# Altium footprint library SamacSys.PcbLib: 1008 footprints (part 34 of 63)
Each footprint in its own frame and in the unit in brackets; x right, y up, seen from the top. Pads: shape width x height; smd on the part's side, far side on the other; paste and mask are expansions set on the pad; w line width, h text height; cw(c..) or ccw(c..) is an arc to the next point about the centre after c.
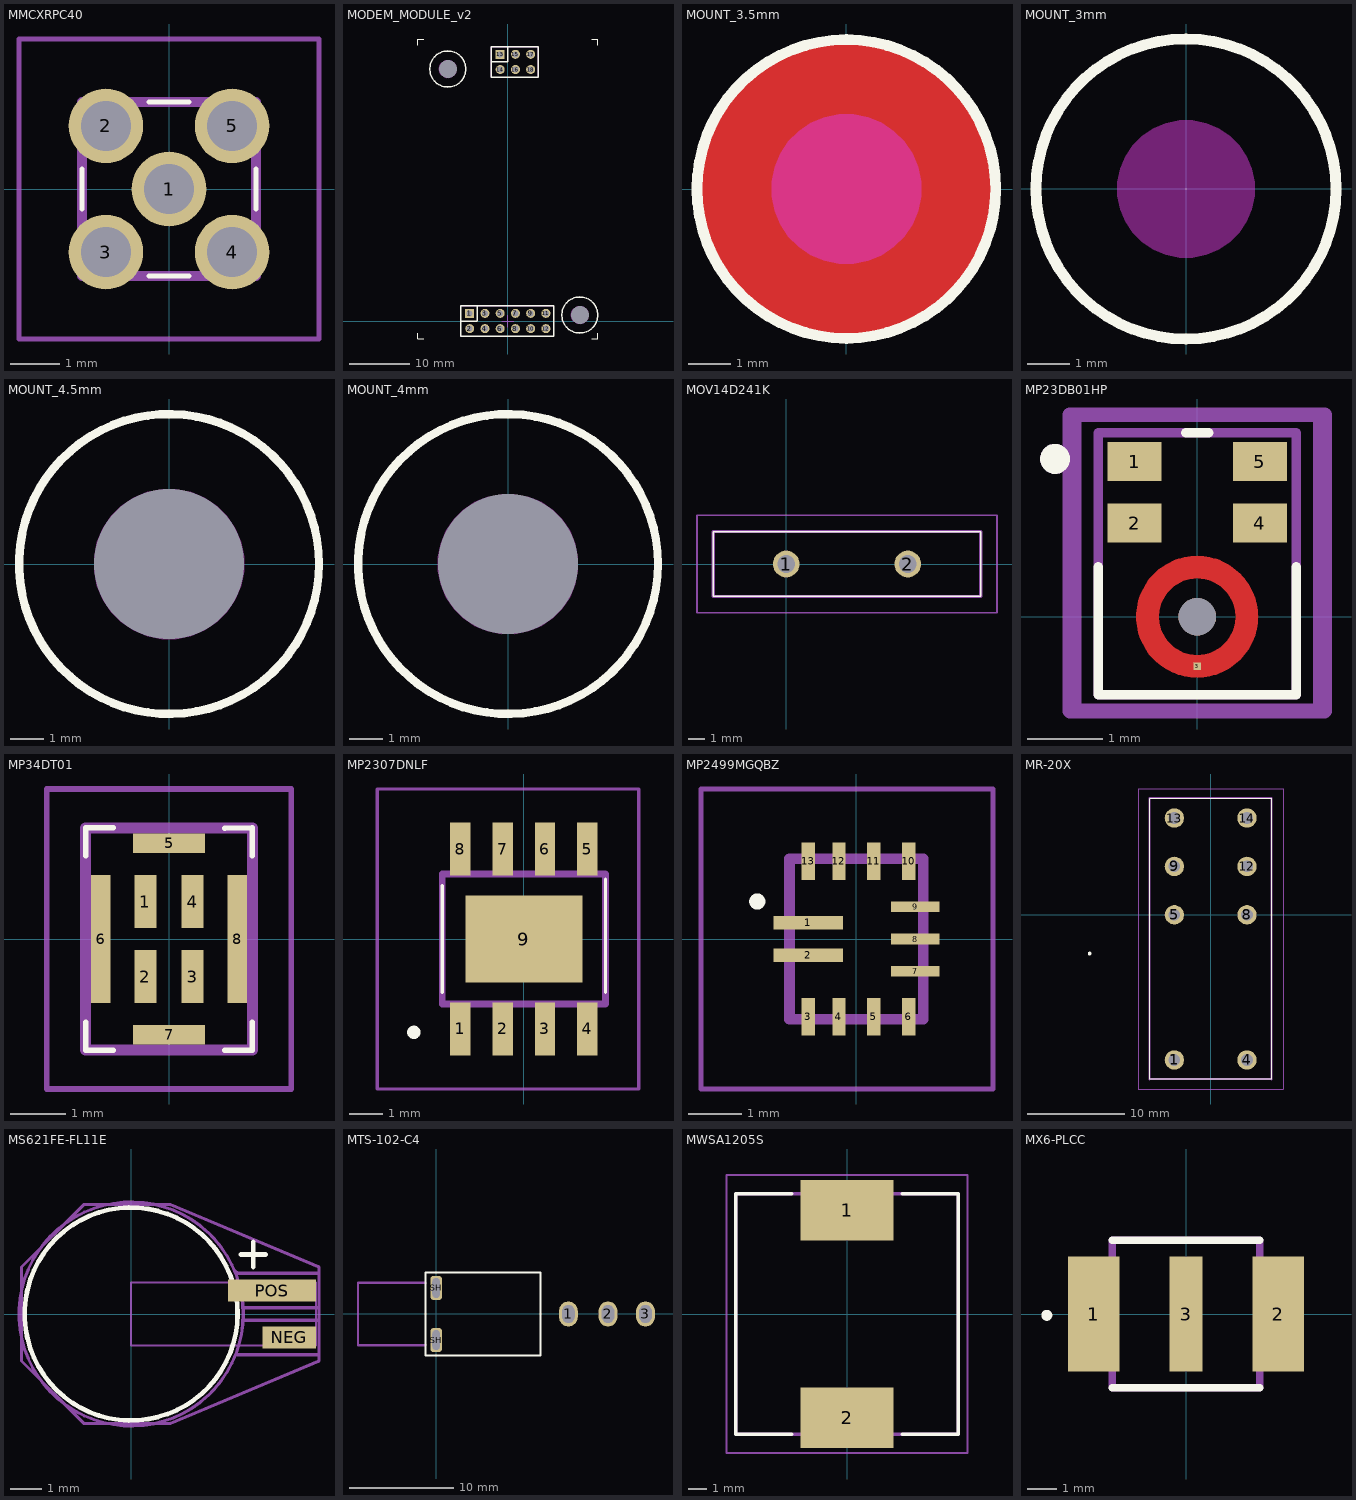
[diagram p33: the footprints below, top view; thin cyan lines are the x and y axes]

## MMCXRPC40 [mm]
pads (5):
  round 1.5 hole 1: 1(0,0) 2(-1.27,1.27) 3(-1.27,-1.27) 4(1.27,-1.27) 5(1.27,1.27)
Top Overlay:
  lines w0.1: -1.75,-0.4 -1.75,0.4 ; -0.4,-1.75 0.4,-1.75 ; -0.4,1.75 0.4,1.75 ; 1.75,-0.4 1.75,0.4
Assembly:
  lines w0.2: -1.75,-1.75 -1.75,1.75 1.75,1.75 1.75,-1.75 -1.75,-1.75
Countryard:
  lines w0.1: -3.02,-3.02 -3.02,3.02 3.02,3.02 3.02,-3.02 -3.02,-3.02
3D body "MMCX-R-PC(40).stp": height 4.49, standoff -2.88, extent -1.75,-1.75 1.75,1.75

## MODEM_MODULE_v2 [mm]
height 10
pads (20):
  rect 1.5x1.5 hole 1: 1(-6.35,1.27) 13(-1.27,44.45)
  round 1.5 hole 1: 2(-6.35,-1.27) 3(-3.81,1.27) 4(-3.81,-1.27) 5(-1.27,1.27) 6(-1.27,-1.27) 7(1.27,1.27) 8(1.27,-1.27) 9(3.81,1.27) 10(3.81,-1.27) 11(6.35,1.27) 12(6.35,-1.27) 14(-1.27,41.91) 15(1.27,44.45) 16(1.27,41.91) 17(3.81,44.45) 18(3.81,41.91)
  round 0 hole 3 unplated: ""(-10,42) ""(12,1)
Top Overlay:
  circle w0.254: c-10,42 r3
  circle w0.254: c12,1 r3
  lines w0.2: -15,-2 -15,-3 -14,-3 ; -15,46 -15,47 -14,47 ; 14,-3 15,-3 15,-2 ; 14,47 15,47 15,46
  lines w0.25: -7.874,0 -5.08,0 ; -5.062,0.018 -5.062,2.54 ; -2.794,43.18 0,43.18 ; 0.018,43.198 0.018,45.72 ; -7.874,-2.54 -7.874,2.54 7.62,2.54 7.62,-2.54 -7.874,-2.54 ; -2.794,40.64 -2.794,45.72 5.08,45.72 5.08,40.64 -2.794,40.64
Top Paste:
  pour cut-out: -12.938,41.984 -12.938,41.787 -12.887,41.397 -12.785,41.018 -12.634,40.654 -12.438,40.314 -12.198,40.002 -11.92,39.724 -11.608,39.484 -11.268,39.288 -10.904,39.137 -10.525,39.035 -10.135,38.984 -9.938,38.984 -9.741,38.984 -9.351,39.035 -8.972,39.137 -8.608,39.288 -8.268,39.484 -7.956,39.724 -7.678,40.002 -7.438,40.314 -7.242,40.654 -7.091,41.018 -6.989,41.397 -6.938,41.787 -6.938,41.984 -6.938,42.181 -6.989,42.571 -7.091,42.95 -7.242,43.314 -7.438,43.654 -7.678,43.966 -7.956,44.244 -8.268,44.484 -8.608,44.68 -8.972,44.831 -9.351,44.933 -9.741,44.984 -9.938,44.984 -10.135,44.984 -10.525,44.933 -10.904,44.831 -11.268,44.68 -11.608,44.484 -11.92,44.244 -12.198,43.966 -12.438,43.654 -12.634,43.314 -12.785,42.95 -12.887,42.571 -12.938,42.181
  pour cut-out: 9.062,0.984 9.062,0.787 9.113,0.397 9.215,0.018 9.366,-0.346 9.562,-0.686 9.802,-0.998 10.08,-1.276 10.392,-1.516 10.732,-1.712 11.096,-1.863 11.475,-1.965 11.865,-2.016 12.062,-2.016 12.259,-2.016 12.649,-1.965 13.028,-1.863 13.392,-1.712 13.732,-1.516 14.044,-1.276 14.322,-0.998 14.562,-0.686 14.758,-0.346 14.909,0.018 15.011,0.397 15.062,0.787 15.062,0.984 15.062,1.181 15.011,1.571 14.909,1.95 14.758,2.314 14.562,2.654 14.322,2.966 14.044,3.244 13.732,3.484 13.392,3.68 13.028,3.831 12.649,3.933 12.259,3.984 12.062,3.984 11.865,3.984 11.475,3.933 11.096,3.831 10.732,3.68 10.392,3.484 10.08,3.244 9.802,2.966 9.562,2.654 9.366,2.314 9.215,1.95 9.113,1.571 9.062,1.181
Keep-Out Layer:
  board cut-out: -10,40.5 -10.148,40.5 -10.438,40.558 -10.711,40.671 -10.956,40.835 -11.165,41.044 -11.329,41.289 -11.442,41.562 -11.5,41.852 -11.5,42 -11.5,42.148 -11.442,42.438 -11.329,42.71 -11.165,42.956 -10.956,43.165 -10.711,43.329 -10.438,43.442 -10.148,43.5 -10,43.5 -9.852,43.5 -9.562,43.442 -9.29,43.329 -9.044,43.165 -8.835,42.956 -8.671,42.711 -8.558,42.438 -8.5,42.148 -8.5,42 -8.5,41.852 -8.558,41.562 -8.671,41.289 -8.835,41.044 -9.044,40.835 -9.289,40.671 -9.562,40.558 -9.852,40.5
  board cut-out: 12,-0.5 11.852,-0.5 11.562,-0.442 11.289,-0.329 11.044,-0.165 10.835,0.044 10.671,0.289 10.558,0.562 10.5,0.852 10.5,1 10.5,1.148 10.558,1.438 10.671,1.71 10.835,1.956 11.044,2.165 11.289,2.329 11.562,2.442 11.852,2.5 12,2.5 12.148,2.5 12.438,2.442 12.71,2.329 12.956,2.165 13.165,1.956 13.329,1.711 13.442,1.438 13.5,1.148 13.5,1 13.5,0.852 13.442,0.562 13.329,0.289 13.165,0.044 12.956,-0.165 12.711,-0.329 12.438,-0.442 12.148,-0.5
Assembly:
  lines w0.1: -2.794,40.64 -2.794,45.72 2.794,45.72 ; -7.874,-2.54 7.62,-2.54 7.62,2.54 -7.874,2.54 -7.874,-2.54
Countryard:
  lines w0.1: -2.794,40.64 -2.794,45.72 5.08,45.72 5.08,40.64 ; -0.984,0 1.016,0 ; 0,-1 0,1 ; -7.874,-2.54 7.62,-2.54 7.62,2.54 -7.874,2.54 -7.874,-2.54
Multi-Layer:
  pour cut-out: -10,39 -10.197,39 -10.587,39.051 -10.966,39.153 -11.33,39.304 -11.67,39.5 -11.982,39.74 -12.26,40.018 -12.5,40.33 -12.696,40.67 -12.847,41.034 -12.949,41.413 -13,41.803 -13,42 -13,42.197 -12.949,42.586 -12.847,42.966 -12.696,43.33 -12.5,43.67 -12.26,43.982 -11.982,44.26 -11.67,44.5 -11.33,44.696 -10.966,44.847 -10.587,44.949 -10.197,45 -10,45 -9.803,45 -9.414,44.949 -9.034,44.847 -8.67,44.696 -8.33,44.5 -8.018,44.26 -7.74,43.982 -7.5,43.67 -7.304,43.33 -7.153,42.966 -7.051,42.587 -7,42.197 -7,42 -7,41.803 -7.051,41.413 -7.153,41.034 -7.304,40.67 -7.5,40.33 -7.74,40.018 -8.018,39.74 -8.33,39.5 -8.67,39.304 -9.034,39.153 -9.413,39.051 -9.803,39
  pour cut-out: 12,-2 11.803,-2 11.413,-1.949 11.034,-1.847 10.67,-1.696 10.33,-1.5 10.018,-1.26 9.74,-0.982 9.5,-0.67 9.304,-0.33 9.153,0.034 9.051,0.413 9,0.803 9,1 9,1.197 9.051,1.586 9.153,1.966 9.304,2.33 9.5,2.67 9.74,2.982 10.018,3.26 10.33,3.5 10.67,3.696 11.034,3.847 11.413,3.949 11.803,4 12,4 12.197,4 12.586,3.949 12.966,3.847 13.33,3.696 13.67,3.5 13.982,3.26 14.26,2.982 14.5,2.67 14.696,2.33 14.847,1.966 14.949,1.587 15,1.197 15,1 15,0.803 14.949,0.413 14.847,0.034 14.696,-0.33 14.5,-0.67 14.26,-0.982 13.982,-1.26 13.67,-1.5 13.33,-1.696 12.966,-1.847 12.586,-1.949 12.197,-2
3D body "PCHSN-10.STEP": height 10, standoff -5, extent 9.5,-1.887 14.5,3.887
3D body "PCHSN-10.STEP": height 10, standoff -5, extent -12.5,39.113 -7.5,44.887
3D body "User Library-PBD_(DS1023-2)_2line_connectors_h=5_0_8_5mm_step_2_54mm.step": height 8.5, standoff -3, extent -2.79,40.7 2.79,45.7
3D body "User Library-PBD_(DS1023-2)_2line_connectors_h=5_0_8_5mm_step_2_54mm (1).step": height 8.5, standoff -3, extent -7.87,-2.48 7.87,2.52

## MOUNT_3.5mm [mm] "H3.5 / OUT7"
Top Layer:
  pour cut-out: 0,-3.5 -0.229,-3.5 -0.684,-3.44 -1.127,-3.321 -1.551,-3.146 -1.949,-2.916 -2.313,-2.637 -2.637,-2.313 -2.916,-1.949 -3.146,-1.551 -3.321,-1.127 -3.44,-0.684 -3.5,-0.229 -3.5,0 -3.5,0.229 -3.44,0.684 -3.321,1.127 -3.146,1.551 -2.916,1.949 -2.637,2.313 -2.313,2.637 -1.949,2.916 -1.551,3.146 -1.127,3.321 -0.684,3.44 -0.229,3.5 0,3.5 0.229,3.5 0.684,3.44 1.127,3.321 1.551,3.146 1.949,2.916 2.313,2.637 2.637,2.313 2.916,1.949 3.146,1.551 3.321,1.127 3.44,0.684 3.5,0.229 3.5,0 3.5,-0.229 3.44,-0.684 3.321,-1.127 3.146,-1.551 2.916,-1.949 2.637,-2.313 2.313,-2.637 1.949,-2.916 1.551,-3.146 1.127,-3.321 0.684,-3.44 0.229,-3.5
Bottom Layer:
  pour cut-out: 0.031,-3.5 -0.198,-3.5 -0.653,-3.44 -1.096,-3.321 -1.52,-3.146 -1.918,-2.916 -2.282,-2.637 -2.606,-2.313 -2.885,-1.949 -3.115,-1.551 -3.29,-1.127 -3.409,-0.684 -3.469,-0.229 -3.469,0 -3.469,0.229 -3.409,0.684 -3.29,1.127 -3.115,1.551 -2.885,1.949 -2.606,2.313 -2.282,2.637 -1.918,2.916 -1.52,3.146 -1.096,3.321 -0.653,3.44 -0.198,3.5 0.031,3.5 0.26,3.5 0.715,3.44 1.159,3.321 1.582,3.146 1.98,2.916 2.344,2.637 2.668,2.313 2.947,1.949 3.177,1.551 3.352,1.127 3.471,0.684 3.531,0.229 3.531,0 3.531,-0.229 3.471,-0.684 3.352,-1.127 3.177,-1.551 2.947,-1.949 2.668,-2.313 2.344,-2.637 1.98,-2.916 1.582,-3.146 1.159,-3.321 0.715,-3.44 0.26,-3.5
Top Overlay:
  circle w0.254: c0,0 r3.5
Keep-Out Layer:
  board cut-out: 0,-1.75 -0.172,-1.75 -0.51,-1.683 -0.829,-1.551 -1.116,-1.359 -1.359,-1.116 -1.551,-0.829 -1.683,-0.51 -1.75,-0.172 -1.75,0 -1.75,0.172 -1.683,0.51 -1.551,0.829 -1.359,1.116 -1.116,1.359 -0.829,1.551 -0.51,1.683 -0.172,1.75 0,1.75 0.172,1.75 0.51,1.683 0.829,1.551 1.116,1.359 1.359,1.116 1.551,0.829 1.683,0.51 1.75,0.172 1.75,0 1.75,-0.172 1.683,-0.51 1.551,-0.829 1.359,-1.116 1.116,-1.359 0.829,-1.551 0.51,-1.683 0.172,-1.75

## MOUNT_3mm [mm] "H3/OUT6"
Top Overlay:
  circle w0.254: c0,0 r3.5
Keep-Out Layer:
  board cut-out: 0,-1.6 -0.158,-1.6 -0.467,-1.539 -0.758,-1.418 -1.02,-1.243 -1.243,-1.02 -1.418,-0.758 -1.539,-0.467 -1.6,-0.158 -1.6,0 -1.6,0.158 -1.539,0.467 -1.418,0.758 -1.243,1.02 -1.02,1.243 -0.758,1.418 -0.467,1.538 -0.158,1.6 0,1.6 0.158,1.6 0.467,1.539 0.758,1.418 1.02,1.243 1.243,1.02 1.418,0.758 1.538,0.467 1.6,0.158 1.6,0 1.6,-0.158 1.539,-0.467 1.418,-0.758 1.243,-1.02 1.02,-1.243 0.758,-1.418 0.467,-1.539 0.158,-1.6
Multi-Layer:
  pour cut-out: 0,-3.5 -0.229,-3.5 -0.684,-3.44 -1.127,-3.321 -1.551,-3.146 -1.949,-2.916 -2.313,-2.637 -2.637,-2.313 -2.916,-1.949 -3.146,-1.551 -3.321,-1.127 -3.44,-0.684 -3.5,-0.229 -3.5,0 -3.5,0.229 -3.44,0.684 -3.321,1.127 -3.146,1.551 -2.916,1.949 -2.637,2.313 -2.313,2.637 -1.949,2.916 -1.551,3.146 -1.127,3.321 -0.684,3.44 -0.229,3.5 0,3.5 0.229,3.5 0.684,3.44 1.127,3.321 1.551,3.146 1.949,2.916 2.313,2.637 2.637,2.313 2.916,1.949 3.146,1.551 3.321,1.127 3.44,0.684 3.5,0.229 3.5,0 3.5,-0.229 3.44,-0.684 3.321,-1.127 3.146,-1.551 2.916,-1.949 2.637,-2.313 2.313,-2.637 1.949,-2.916 1.551,-3.146 1.127,-3.321 0.684,-3.44 0.229,-3.5

## MOUNT_4.5mm [mm] "H4.5 / OUT9"
pads (1):
  round 0 hole 4.5 unplated: ""(0,0)
Top Overlay:
  circle w0.254: c0,0 r4.5
Keep-Out Layer:
  board cut-out: 0,-2.25 -0.222,-2.25 -0.656,-2.164 -1.066,-1.994 -1.434,-1.748 -1.748,-1.434 -1.994,-1.066 -2.164,-0.656 -2.25,-0.222 -2.25,0 -2.25,0.222 -2.164,0.656 -1.994,1.066 -1.748,1.434 -1.434,1.748 -1.066,1.994 -0.656,2.164 -0.222,2.25 0,2.25 0.222,2.25 0.656,2.164 1.066,1.994 1.434,1.748 1.748,1.434 1.994,1.066 2.164,0.656 2.25,0.222 2.25,0 2.25,-0.222 2.164,-0.656 1.994,-1.066 1.748,-1.434 1.434,-1.748 1.066,-1.994 0.656,-2.164 0.222,-2.25
Multi-Layer:
  pour cut-out: 0,-4.5 -0.295,-4.5 -0.88,-4.423 -1.45,-4.27 -1.995,-4.045 -2.505,-3.75 -2.973,-3.391 -3.391,-2.973 -3.75,-2.505 -4.045,-1.995 -4.27,-1.45 -4.423,-0.88 -4.5,-0.295 -4.5,0 -4.5,0.295 -4.423,0.88 -4.27,1.45 -4.045,1.995 -3.75,2.505 -3.391,2.973 -2.973,3.391 -2.505,3.75 -1.995,4.045 -1.45,4.27 -0.88,4.423 -0.295,4.5 0,4.5 0.295,4.5 0.88,4.423 1.45,4.27 1.995,4.045 2.505,3.75 2.973,3.391 3.391,2.973 3.75,2.505 4.045,1.995 4.27,1.45 4.423,0.88 4.5,0.295 4.5,0 4.5,-0.295 4.423,-0.88 4.27,-1.45 4.045,-1.995 3.75,-2.505 3.391,-2.973 2.973,-3.391 2.505,-3.75 1.995,-4.045 1.45,-4.27 0.88,-4.423 0.295,-4.5

## MOUNT_4mm [mm] "H4 / OUT9"
pads (1):
  round 0 hole 4.2 unplated: ""(0,0)
Top Overlay:
  circle w0.254: c0,0 r4.5
Keep-Out Layer:
  board cut-out: 0,-2.1 -0.207,-2.1 -0.613,-2.019 -0.995,-1.861 -1.339,-1.631 -1.631,-1.339 -1.861,-0.995 -2.019,-0.613 -2.1,-0.207 -2.1,0 -2.1,0.207 -2.019,0.613 -1.861,0.995 -1.631,1.339 -1.339,1.631 -0.995,1.861 -0.613,2.019 -0.207,2.1 0,2.1 0.207,2.1 0.613,2.019 0.995,1.861 1.339,1.631 1.631,1.339 1.861,0.995 2.019,0.613 2.1,0.207 2.1,0 2.1,-0.207 2.019,-0.613 1.861,-0.995 1.631,-1.339 1.339,-1.631 0.995,-1.861 0.613,-2.019 0.207,-2.1
Multi-Layer:
  pour cut-out: 0,-4.5 -0.295,-4.5 -0.88,-4.423 -1.45,-4.27 -1.995,-4.045 -2.505,-3.75 -2.973,-3.391 -3.391,-2.973 -3.75,-2.505 -4.045,-1.995 -4.27,-1.45 -4.423,-0.88 -4.5,-0.295 -4.5,0 -4.5,0.295 -4.423,0.88 -4.27,1.45 -4.045,1.995 -3.75,2.505 -3.391,2.973 -2.973,3.391 -2.505,3.75 -1.995,4.045 -1.45,4.27 -0.88,4.423 -0.295,4.5 0,4.5 0.295,4.5 0.88,4.423 1.45,4.27 1.995,4.045 2.505,3.75 2.973,3.391 3.391,2.973 3.75,2.505 4.045,1.995 4.27,1.45 4.423,0.88 4.5,0.295 4.5,0 4.5,-0.295 4.423,-0.88 4.27,-1.45 4.045,-1.995 3.75,-2.505 3.391,-2.973 2.973,-3.391 2.505,-3.75 1.995,-4.045 1.45,-4.27 0.88,-4.423 0.295,-4.5

## MOV14D241K [mm]
pads (2):
  round 1.65 hole 1.1: 1(0,0) 2(7.5,0)
Top Overlay:
  lines w0.1: -4.5,-2 -4.5,2 12,2 12,-2 -4.5,-2
Assembly:
  lines w0.2: -4.5,-2 -4.5,2 12,2 12,-2 -4.5,-2
Countryard:
  lines w0.1: -5.5,-3 -5.5,3 13,3 13,-3 -5.5,-3
3D body "mov-14d241k.stp": height 22.23, standoff -17.75, extent -4.45,-2 12.05,2

## MP23DB01HP [mm]
pads (6):
  rect 0.725x0.522 smd paste-1: 1(-0.837,2.074) 2(-0.837,1.252) 4(0.837,1.252) 5(0.837,2.074)
  rect 0.1x0.1 smd paste-1 mask+0: 3(0,-0.662)
  round 0.5 hole 0.5 unplated: ""(0,0)
Top Layer:
  region: 242 vertices and 0 holes, not listed, extent -0.813,-0.812 0.813,0.813
Top Overlay:
  circle w0.2: c-1.9,2.11 r0.1
  lines w0.127: -1.325,0.671 -1.325,-1.04 1.325,-1.04 1.325,0.671 ; -0.155,2.46 0.155,2.46
Top Paste:
  drawing of 6 lines, arcs and shapes, not listed
Top Solder:
  circle w0.913: c0,0 r0.456
Assembly:
  circle w0.2: c-1.9,2.11 r0.1
  lines w0.127: -1.325,-1.04 1.325,-1.04 1.325,2.46 -1.325,2.46 -1.325,-1.04
  lines w0.2: -1.7,-1.26 -1.7,2.7 1.7,2.7 1.7,-1.26 -1.7,-1.26
Countryard:
  lines w0.05: -1.575,-1.29 1.575,-1.29 1.575,2.71 -1.575,2.71 -1.575,-1.29
  lines w0.1: -1.6,-1.3 -1.6,2.7 1.6,2.7 1.6,-1.3 -1.6,-1.3

## MP34DT01 [mm]
pads (8):
  rect 0.4x0.95 smd: 1(-0.425,0.675) 2(-0.425,-0.675) 3(0.425,-0.675) 4(0.425,0.675)
  rect 1.3x0.35 smd: 5(0,1.725) 7(0,-1.725)
  rect 0.35x2.3 smd: 6(-1.225,0) 8(1.225,0)
Top Overlay:
  lines w0.1: -1.5,-1.5 -1.5,-2 -1,-2 ; -1.5,1.5 -1.5,2 -1,2 ; 1,-2 1.225,-2 ; 1,1.992 1.5,2 1.5,1.5 ; 1.25,-2 1.225,-2 ; 1.5,-1.5 1.5,-2 1.225,-2
Assembly:
  lines w0.2: -1.5,-2 1.5,-2 1.5,2 -1.5,2 -1.5,-2
Countryard:
  lines w0.1: -2.2,-2.7 2.2,-2.7 2.2,2.7 -2.2,2.7 -2.2,-2.7
3D body "MP34DT01.stp": height 1.2, standoff 0, extent -1.5,-2 1.5,2

## MP2307DNLF [mm]
pads (9):
  rect 0.61x1.6 smd: 1(-1.905,-2.7) 2(-0.635,-2.7) 3(0.635,-2.7) 4(1.905,-2.7) 5(1.905,2.7) 6(0.635,2.7) 7(-0.635,2.7) 8(-1.905,2.7)
  rect 3.51x2.62 smd: 9(0,0)
Top Overlay:
  lines w0.1: -2.45,-1.6 -2.45,1.6 ; 2.45,-1.6 2.45,1.8
  lines w0.2: -3.4,-2.8 cw(c-3.3,-2.8) -3.2,-2.8 cw(c-3.3,-2.8) -3.4,-2.8
Assembly:
  lines w0.2: -2.45,-1.95 -2.45,1.95 2.45,1.95 2.45,-1.95 -2.45,-1.95
Countryard:
  lines w0.1: -4.4,-4.5 -4.4,4.5 3.45,4.5 3.45,-4.5 -4.4,-4.5
3D body "MP2307DN-LF.stp": height 1.7, standoff 0, extent -2.5,-3.1 2.5,3.1

## MP2499MGQBZ [mm]
pads (13):
  rect 1.3x0.25 smd: 1(-0.9,0.3) 2(-0.9,-0.3)
  rect 0.25x0.7 smd: 3(-0.9,-1.45) 4(-0.325,-1.45) 5(0.325,-1.45) 6(0.975,-1.45) 10(0.975,1.45) 11(0.325,1.45) 12(-0.325,1.45) 13(-0.9,1.45)
  rect 0.9x0.2 smd: 7(1.1,-0.6) 8(1.1,0) 9(1.1,0.6)
Top Overlay:
  lines w0.2: -1.9,0.7 ccw(c-1.85,0.7) -1.8,0.7 ; -1.9,0.7 cw(c-1.85,0.7) -1.8,0.7 ; -1.9,0.7 ccw(c-1.85,0.7) -1.8,0.7
Assembly:
  lines w0.2: -1.25,-1.5 1.25,-1.5 1.25,1.5 -1.25,1.5 -1.25,-1.5
Countryard:
  lines w0.1: -2.9,-2.8 2.55,-2.8 2.55,2.8 -2.9,2.8 -2.9,-2.8
3D body "MP2499MGQB-Z.stp": height 1.1, standoff 0, extent -1.25,-1.5 1.25,1.5

## MR-20X [mm] "Relay KIPPribor"
height 26
pads (8):
  round 2 hole 1.2: 1(-3.75,-15) 4(3.75,-15) 5(-3.75,0) 8(3.75,0) 9(-3.75,5) 12(3.75,5) 13(-3.75,10) 14(3.75,10)
Top Overlay:
  lines w0.1: -6.3,-17 -6.3,12 ; -6.3,-16.95 6.3,-16.95 ; -6.3,12.05 6.3,12.05 ; 6.3,-17 6.3,12
  lines w0.2: -12.5,-4.1 cw(c-12.5,-4) -12.5,-3.9 cw(c-12.5,-4) -12.5,-4.1
Assembly:
  lines w0.2: -6.3,-17 -6.3,12 ; -6.3,-16.95 6.3,-16.95 ; -6.3,12.05 6.3,12.05 ; 6.3,-17 6.3,12
Countryard:
  lines w0.1: -7.5,-18 7.5,-18 7.5,13 -7.5,13 -7.5,-18
3D body: height 26, standoff 0, extent -6.3,-17 6.3,12

## MS621FE-FL11E [mm]
pads (2):
  rect 1.7x0.7 smd: NEG(5.05,-0.75)
  rect 2.8x0.7 smd: POS(4.5,0.75)
Top Overlay:
  circle w0.15: c0,0 r3.4
  lines w0.15: 3.5,1.9 4.3,1.9 ; 3.9,1.5 3.9,2.3
Top Assembly:
  circle w0.1: c0,0 r3.579
  lines w0.1: 3.3,1.4 3.4,1.3 6,1.3 6,0.2 3.6,0.2 ; 3.4,-1.3 6,-1.3 6,-0.2 3.6,-0.2
Top Courtyard:
  lines w0.1: -3.5,-1.5 -3.5,1.5 -1.5,3.5 1.25,3.5 6,1.5 6,-1.5 1.25,-3.5 -1.5,-3.5 -3.5,-1.5
Assembly:
  lines w0.06: 0,-1 5.9,-1 5.9,1 0,1 0,-1
3D body "step_temp.STEP": height 2.8, standoff 0, extent -3.4,-3.4 5.9,3.4

## MTS-102-C4 [mm]
pads (5):
  oval 1.8x2.4 hole 1.2 slot 1.7 at 90 deg: 1(12.7,0) 2(16.5,0) 3(20.1,0)
  rrect50% 1.1x2.3 hole 0.7 slot 1.9 at 90 deg: SH(0,-2.5) SH(0,2.5)
Top Overlay:
  lines w0.2: -1,-4 10,-4 10,4 -1,4 -1,-4
Top Assembly:
  lines w0.2: -1,-3 -7.5,-3 -7.5,3 -1,3
3D body "MTS-1xx-C4-blue-OFF.step": height 13.2, standoff -3.2, extent -14.432,-3.95 20.75,3.95

## MWSA1205S [mm]
height 5
pads (2):
  rect 5x3.25 smd: 1(0,5.6) 2(0,-5.6)
Top Overlay:
  lines w0.2: -3,-6.5 -6,-6.5 -6,6.5 -3,6.5 ; 3,-6.5 6,-6.5 6,6.5 3,6.5
Assembly:
  lines w0.2: -6,-6.5 -6,6.5 6,6.5 6,-6.5 -6,-6.5
Countryard:
  lines w0.1: -6.5,-7.5 -6.5,7.5 6.5,7.5 6.5,-7.5 -6.5,-7.5
3D body: height 5, standoff 0, extent -6,-6.5 6,6.5

## MX6-PLCC [mm]
pads (3):
  rect 1.75x3.9 smd: 1(-3.125,0) 2(3.125,0)
  rect 1.1x3.9 smd: 3(0,0)
Top Overlay:
  circle w0.254: c-4.709,-0.045 r0.057
  lines w0.254: -2.5,-2.5 2.5,-2.5 ; -2.5,2.5 2.5,2.5
Assembly:
  lines w0.254: -2.5,-2.5 -2.5,2.5 2.5,2.5 2.5,-2.5 -2.5,-2.5